# Altium schematic symbol library Robert_.SchLib: 177 symbols (part 3 of 6)
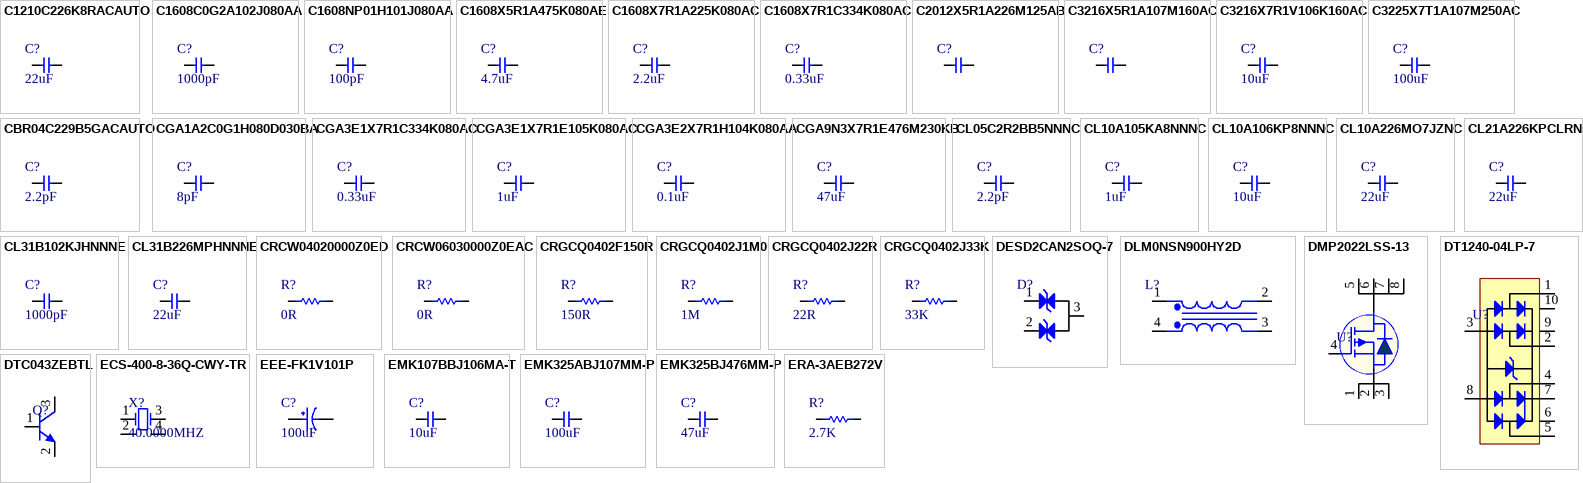
[diagram p8: symbols C1210C226K8RACAUTO to ERA-3AEB272V]

## CRGCQ0402J1M0
designator R?, comment 1M
RES 1M OHM 5% 1/16W 0402; Manufacturer: TE Connectivity; Manufacturer Part Number: CRGCQ0402J1M0; Value: 1MR; Max Power Dissipation: 63mW; Temperature Coefficient: 100ppm/°C; Power Rating: 62.5mW; Voltage Rating: 50V; Supplier: Arrow Electronics; Supplier Part Number: CRGCQ0402J1M0; RoHS: Yes; Category: Chip SMD Resistors; Stock: 50000; Pricing: 20000=0.0015 (USD); Case/Package: 0402; Case Code (Imperial): 0402; Case Code (Metric): 1005; Min Operating Temperature: -55°C; Max Operating Temperature: 155°C; Features: Moisture Resistant,Automotive AEC-Q200; Packaging: Cut Tape; Tolerance: 5%; Number of Terminations: 2; Series: CRGCQ; Voltage Rating (DC): 50V; Height: 400um; Ratings: AEC-Q200; RoHS Compliant: Yes; ComponentLink1URL: http://datasheet.octopart.com/CRGCQ0402J1M0-TE-Connectivity-datasheet-114679081.pdf?src-supplier=Mouser; ComponentLink1Description: http://datasheet.octopart.com/CRGCQ0402J1M0-TE-Connectivity-datasheet-114679081.pdf?src-supplier=Mouser; ComponentLink2URL: http://datasheet.octopart.com/CRGCQ0402J1M0-TE-Connectivity-datasheet-114679081.pdf?src-supplier=Arrow+Electronics; ComponentLink2Description: http://datasheet.octopart.com/CRGCQ0402J1M0-TE-Connectivity-datasheet-114679081.pdf?src-supplier=Arrow+Electronics; ComponentLink3URL: http://datasheet.octopart.com/CRGCQ0402J1M0-TE-Connectivity-datasheet-114679081.pdf?src-supplier=Onlinecomponents.com; ComponentLink3Description: http://datasheet.octopart.com/CRGCQ0402J1M0-TE-Connectivity-datasheet-114679081.pdf?src-supplier=Onlinecomponents.com; ComponentLink4URL: http://datasheet.octopart.com/CRGCQ0402J1M0-TE-Connectivity-datasheet-114679081.pdf?src-supplier=Digi-Key; ComponentLink4Description: http://datasheet.octopart.com/CRGCQ0402J1M0-TE-Connectivity-datasheet-114679081.pdf?src-supplier=Digi-Key; ComponentLink5URL: http://datasheet.octopart.com/CRGCQ0402J1M0-TE-Connectivity-datasheet-114679081.pdf?src-supplier=Verical; ComponentLink5Description: http://datasheet.octopart.com/CRGCQ0402J1M0-TE-Connectivity-datasheet-114679081.pdf?src-supplier=Verical; ComponentLink6URL: https://www.te.com/commerce/DocumentDelivery/DDEController?Action=srchrtrv&DocNm=1773204-3&DocType=DS&DocLang=English&src-supplier=Digi-Key; ComponentLink6Description: https://www.te.com/commerce/DocumentDelivery/DDEController?Action=srchrtrv&DocNm=1773204-3&DocType=DS&DocLang=English&src-supplier=Digi-Key; ComponentLink7URL: http://datasheet.octopart.com/CRGCQ0402J1M0-TE-Connectivity-datasheet-114679081.pdf?src-supplier=Newark; ComponentLink7Description: http://datasheet.octopart.com/CRGCQ0402J1M0-TE-Connectivity-datasheet-114679081.pdf?src-supplier=Newark; ComponentLink8URL: http://datasheet.octopart.com/CRGCQ0402J1M0-TE-Connectivity-datasheet-114679081.pdf?src-supplier=Avnet; ComponentLink8Description: http://datasheet.octopart.com/CRGCQ0402J1M0-TE-Connectivity-datasheet-114679081.pdf?src-supplier=Avnet; ComponentLink9URL: http://datasheet.octopart.com/CRGCQ0402J1M0-TE-Connectivity-datasheet-114679081.pdf?src-supplier=Farnell; ComponentLink9Description: http://datasheet.octopart.com/CRGCQ0402J1M0-TE-Connectivity-datasheet-114679081.pdf?src-supplier=Farnell; ComponentLink10URL: http://datasheet.octopart.com/CRGCQ0402J1M0-TE-Connectivity-datasheet-114679081.pdf?src-supplier=Sager+Electronics; ComponentLink10Description: http://datasheet.octopart.com/CRGCQ0402J1M0-TE-Connectivity-datasheet-114679081.pdf?src-supplier=Sager+Electronics; ComponentLink11URL: http://datasheet.octopart.com/CRGCQ0402J1M0-TE-Connectivity-datasheet-114679081.pdf?src-supplier=TME; ComponentLink11Description: http://datasheet.octopart.com/CRGCQ0402J1M0-TE-Connectivity-datasheet-114679081.pdf?src-supplier=TME; ComponentLink12URL: http://datasheet.octopart.com/CRGCQ0402J1M0-TE-Connectivity-datasheet-114679081.pdf?src-supplier=Electro+Sonic; ComponentLink12Description: http://datasheet.octopart.com/CRGCQ0402J1M0-TE-Connectivity-datasheet-114679081.pdf?src-supplier=Electro+Sonic; ComponentLink13URL: http://datasheet.octopart.com/CRGCQ0402J1M0-TE-Connectivity-datasheet-114679081.pdf?src-supplier=Interstate+Connecting+Components; ComponentLink13Description: http://datasheet.octopart.com/CRGCQ0402J1M0-TE-Connectivity-datasheet-114679081.pdf?src-supplier=Interstate+Connecting+Components; ComponentLink14URL: http://datasheet.octopart.com/CRGCQ0402J1M0-TE-Connectivity-datasheet-114679081.pdf?src-supplier=Heilind+Electronics; ComponentLink14Description: http://datasheet.octopart.com/CRGCQ0402J1M0-TE-Connectivity-datasheet-114679081.pdf?src-supplier=Heilind+Electronics; ComponentLink15URL: https://datasheet.octopart.com/CRGCQ0402J1M0-TE-Connectivity-datasheet-114679081.pdf?src-supplier=Master+Electronics; ComponentLink15Description: https://datasheet.octopart.com/CRGCQ0402J1M0-TE-Connectivity-datasheet-114679081.pdf?src-supplier=Master+Electronics
footprint Res-0402
pins: 1, 2

## CRGCQ0402J22R
designator R?, comment 22R
RES 22 OHM 5% 1/16W 0402; Manufacturer: TE Connectivity; Manufacturer Part Number: CRGCQ0402J22R; Supplier: Avnet; Supplier Part Number: 73AC8982; RoHS: Yes; Category: Chip SMD Resistors; Stock: 20000; Pricing: 1=0.036, 25=0.01, 100=0.008, 250=0.006, 500=0.005 (USD); ComponentLink1URL: https://www.te.com/commerce/DocumentDelivery/DDEController?Action=srchrtrv&amp;DocNm=1773204-3&amp;DocType=DS&amp;DocLang=English&src-supplier=Digi-Key; ComponentLink1Description: https://www.te.com/commerce/DocumentDelivery/DDEController?Action=srchrtrv&amp;DocNm=1773204-3&amp;DocType=DS&amp;DocLang=English&src-supplier=Digi-Key; ComponentLink2URL: https://4donline.ihs.com/images/VipMasterIC/IC/TYEL/TYEL-S-A0004929575/TYEL-S-A0004929575-1.pdf?hkey=52A5661711E402568146F3353EA87419&src-supplier=Newark; ComponentLink2Description: https://4donline.ihs.com/images/VipMasterIC/IC/TYEL/TYEL-S-A0004929575/TYEL-S-A0004929575-1.pdf?hkey=52A5661711E402568146F3353EA87419&src-supplier=Newark; ComponentLink3URL: https://4donline.ihs.com/images/VipMasterIC/IC/TYEL/TYEL-S-A0004929575/TYEL-S-A0004929575-1.pdf?hkey=52A5661711E402568146F3353EA87419&src-supplier=Element14; ComponentLink3Description: https://4donline.ihs.com/images/VipMasterIC/IC/TYEL/TYEL-S-A0004929575/TYEL-S-A0004929575-1.pdf?hkey=52A5661711E402568146F3353EA87419&src-supplier=Element14; ComponentLink4URL: https://datasheet.octopart.com/CRGCQ0402J22R-TE-Connectivity-datasheet-114679081.pdf?src-supplier=Master+Electronics; ComponentLink4Description: https://datasheet.octopart.com/CRGCQ0402J22R-TE-Connectivity-datasheet-114679081.pdf?src-supplier=Master+Electronics
footprint Res-0402
pins: 1, 2

## CRGCQ0402J33K
designator R?, comment 33K
RES 33K OHM 5% 1/16W 0402; Manufacturer: TE Connectivity; Manufacturer Part Number: CRGCQ0402J33K; Value: 33kR; Max Power Dissipation: 63mW; Temperature Coefficient: 100ppm/°C; Power Rating: 62.5mW; Voltage Rating: 50V; Supplier: Arrow Electronics; Supplier Part Number: CRGCQ0402J33K; RoHS: Yes; Category: Chip SMD Resistors; Stock: 7846; Pricing: 1=0.0162, 10=0.0016, 100=0.0008, 500=0.0007, 1000=0.0005, 6000=0.0004 (USD); Case/Package: 0402; Case Code (Imperial): 0402; Case Code (Metric): 1005; Min Operating Temperature: -55°C; Max Operating Temperature: 155°C; Features: Moisture Resistant,Automotive AEC-Q200; Packaging: Cut Tape; Tolerance: 5%; Number of Terminations: 2; Series: CRGCQ; Voltage Rating (DC): 50V; Height: 400um; Ratings: AEC-Q200; RoHS Compliant: Yes; ComponentLink1URL: http://datasheet.octopart.com/CRGCQ0402J33K-TE-Connectivity-datasheet-114679081.pdf?src-supplier=Mouser; ComponentLink1Description: http://datasheet.octopart.com/CRGCQ0402J33K-TE-Connectivity-datasheet-114679081.pdf?src-supplier=Mouser; ComponentLink2URL: http://datasheet.octopart.com/CRGCQ0402J33K-TE-Connectivity-datasheet-114679081.pdf?src-supplier=Verical; ComponentLink2Description: http://datasheet.octopart.com/CRGCQ0402J33K-TE-Connectivity-datasheet-114679081.pdf?src-supplier=Verical; ComponentLink3URL: http://datasheet.octopart.com/CRGCQ0402J33K-TE-Connectivity-datasheet-114679081.pdf?src-supplier=Onlinecomponents.com; ComponentLink3Description: http://datasheet.octopart.com/CRGCQ0402J33K-TE-Connectivity-datasheet-114679081.pdf?src-supplier=Onlinecomponents.com; ComponentLink4URL: http://datasheet.octopart.com/CRGCQ0402J33K-TE-Connectivity-datasheet-114679081.pdf?src-supplier=Arrow+Electronics; ComponentLink4Description: http://datasheet.octopart.com/CRGCQ0402J33K-TE-Connectivity-datasheet-114679081.pdf?src-supplier=Arrow+Electronics; ComponentLink5URL: http://datasheet.octopart.com/CRGCQ0402J33K-TE-Connectivity-datasheet-114679081.pdf?src-supplier=Digi-Key; ComponentLink5Description: http://datasheet.octopart.com/CRGCQ0402J33K-TE-Connectivity-datasheet-114679081.pdf?src-supplier=Digi-Key; ComponentLink6URL: https://www.te.com/commerce/DocumentDelivery/DDEController?Action=srchrtrv&DocNm=1773204-3&DocType=DS&DocLang=English&src-supplier=Digi-Key; ComponentLink6Description: https://www.te.com/commerce/DocumentDelivery/DDEController?Action=srchrtrv&DocNm=1773204-3&DocType=DS&DocLang=English&src-supplier=Digi-Key; ComponentLink7URL: http://datasheet.octopart.com/CRGCQ0402J33K-TE-Connectivity-datasheet-114679081.pdf?src-supplier=Newark; ComponentLink7Description: http://datasheet.octopart.com/CRGCQ0402J33K-TE-Connectivity-datasheet-114679081.pdf?src-supplier=Newark; ComponentLink8URL: http://datasheet.octopart.com/CRGCQ0402J33K-TE-Connectivity-datasheet-114679081.pdf?src-supplier=Farnell; ComponentLink8Description: http://datasheet.octopart.com/CRGCQ0402J33K-TE-Connectivity-datasheet-114679081.pdf?src-supplier=Farnell; ComponentLink9URL: http://datasheet.octopart.com/CRGCQ0402J33K-TE-Connectivity-datasheet-114679081.pdf?src-supplier=Avnet; ComponentLink9Description: http://datasheet.octopart.com/CRGCQ0402J33K-TE-Connectivity-datasheet-114679081.pdf?src-supplier=Avnet; ComponentLink10URL: http://datasheet.octopart.com/CRGCQ0402J33K-TE-Connectivity-datasheet-114679081.pdf?src-supplier=TME; ComponentLink10Description: http://datasheet.octopart.com/CRGCQ0402J33K-TE-Connectivity-datasheet-114679081.pdf?src-supplier=TME; ComponentLink11URL: http://datasheet.octopart.com/CRGCQ0402J33K-TE-Connectivity-datasheet-114679081.pdf?src-supplier=Interstate+Connecting+Components; ComponentLink11Description: http://datasheet.octopart.com/CRGCQ0402J33K-TE-Connectivity-datasheet-114679081.pdf?src-supplier=Interstate+Connecting+Components; ComponentLink12URL: http://datasheet.octopart.com/CRGCQ0402J33K-TE-Connectivity-datasheet-114679081.pdf?src-supplier=Heilind+Electronics; ComponentLink12Description: http://datasheet.octopart.com/CRGCQ0402J33K-TE-Connectivity-datasheet-114679081.pdf?src-supplier=Heilind+Electronics; ComponentLink13URL: http://datasheet.octopart.com/CRGCQ0402J33K-TE-Connectivity-datasheet-114679081.pdf?src-supplier=Electro+Sonic; ComponentLink13Description: http://datasheet.octopart.com/CRGCQ0402J33K-TE-Connectivity-datasheet-114679081.pdf?src-supplier=Electro+Sonic; ComponentLink14URL: http://datasheet.octopart.com/CRGCQ0402J33K-TE-Connectivity-datasheet-114679081.pdf?src-supplier=Sager+Electronics; ComponentLink14Description: http://datasheet.octopart.com/CRGCQ0402J33K-TE-Connectivity-datasheet-114679081.pdf?src-supplier=Sager+Electronics; ComponentLink15URL: https://datasheet.octopart.com/CRGCQ0402J33K-TE-Connectivity-datasheet-114679081.pdf?src-supplier=Master+Electronics; ComponentLink15Description: https://datasheet.octopart.com/CRGCQ0402J33K-TE-Connectivity-datasheet-114679081.pdf?src-supplier=Master+Electronics
footprint Res-0402
pins: 1, 2

## DESD2CAN2SOQ-7
designator D?
TVS DIODE 24VWM 41VC SOT23; Manufacturer: Diodes; Manufacturer Part Number: DESD2CAN2SOQ-7; Number of Bidirectional Channels: 2; Reverse Standoff Voltage: 24V; Min Breakdown Voltage: 25.4V; Peak Pulse Power: 230W; Power Line Protection: No; Peak Pulse Current: 5A; Diode Type: ZENER; Supplier: Future Electronics; Supplier Part Number: 5053887; RoHS: Yes; Category: TVS Diodes; Stock: 18000; Pricing: 3000=0.109, 6000=0.107, 12000=0.105, 15000=0.104, 45000=0.101 (USD); Mounting Technology: Surface Mount; Case/Package: TO-236-3; Min Operating Temperature: -65°C; Max Operating Temperature: 150°C; Packaging: Cut Tape; Series: Automotive, AEC-Q101; RoHS Compliant: Yes; ComponentLink1URL: http://www.farnell.com/datasheets/2814365.pdf?src-supplier=Farnell; ComponentLink1Description: http://www.farnell.com/datasheets/2814365.pdf?src-supplier=Farnell; ComponentLink2URL: http://www.mouser.com/ds/2/115/DESD2CAN2SOQ-520157.pdf?src-supplier=Mouser; ComponentLink2Description: http://www.mouser.com/ds/2/115/DESD2CAN2SOQ-520157.pdf?src-supplier=Mouser; ComponentLink3URL: http://www.farnell.com/datasheets/2814365.pdf?src-supplier=Newark; ComponentLink3Description: http://www.farnell.com/datasheets/2814365.pdf?src-supplier=Newark; ComponentLink4URL: http://www.farnell.com/datasheets/2814365.pdf?src-supplier=Element14; ComponentLink4Description: http://www.farnell.com/datasheets/2814365.pdf?src-supplier=Element14; ComponentLink5URL: https://www.diodes.com/assets/Datasheets/DESD2CAN2SOQ.pdf?src-supplier=Digi-Key; ComponentLink5Description: https://www.diodes.com/assets/Datasheets/DESD2CAN2SOQ.pdf?src-supplier=Digi-Key
footprint SOT-23 (TRANS NPN 40V 0.6A SOT23)
pins: 1, 2, 3

## DLM0NSN900HY2D
designator L?
CMC 100MA 2LN 90 OHM SMD; Manufacturer: Murata; Manufacturer Part Number: DLM0NSN900HY2D; Impedance: 90R; Number of Lines: 2; Voltage Rating (DC): 5V; Supplier: Rs; Supplier Part Number: 2235027P; RoHS: Yes; Category: Common Mode Chokes; Stock: 4650; Pricing: 250=0.066, 500=0.054, 1000=0.05, 2500=0.043 (GBP); Mounting Technology: Surface Mount; Case Code (Imperial): 0302; Case Code (Metric): 0806; Min Operating Temperature: -40°C; Max Operating Temperature: 85°C; Series: -; Max Current Rating: 100mA; Length: 850um; Width: 650um; RoHS Compliant: Yes; ComponentLink1URL: https://datasheet.octopart.com/DLM0NSN900HY2D-Murata-datasheet-140316808.pdf?src-supplier=Element14; ComponentLink1Description: https://datasheet.octopart.com/DLM0NSN900HY2D-Murata-datasheet-140316808.pdf?src-supplier=Element14; ComponentLink2URL: https://www.murata.com/en-global/products/productdata/8799424610334/EFLD0009.pdf?src-supplier=Digi-Key; ComponentLink2Description: https://www.murata.com/en-global/products/productdata/8799424610334/EFLD0009.pdf?src-supplier=Digi-Key; ComponentLink3URL: https://datasheet.octopart.com/DLM0NSN900HY2D-Murata-datasheet-140316808.pdf?src-supplier=Newark; ComponentLink3Description: https://datasheet.octopart.com/DLM0NSN900HY2D-Murata-datasheet-140316808.pdf?src-supplier=Newark
footprint DLM0NSN900HY2D
pins: 1, 2, 3, 4

## DMP2022LSS-13
designator U?
MOSFET P-CH 20V 10A 8SOP; Manufacturer: Diodes; Manufacturer Part Number: DMP2022LSS-13; Supplier: Avnet; Supplier Part Number: DMP2022LSS-13; RoHS: Yes; Category: MOSFETs; Stock: 37500; Pricing: 2500=0.18459, 5000=0.17798, 10000=0.17262, 15000=0.16758, 20000=0.16128, 25000=0.15876, 250000=0.15624 (USD); ComponentLink1URL: https://datasheet.ciiva.com/946/ds31373-946629.pdf?src-supplier=Digi-Key; ComponentLink1Description: https://datasheet.ciiva.com/946/ds31373-946629.pdf?src-supplier=Digi-Key; ComponentLink2URL: https://datasheet.ciiva.com/946/ds31373-946629.pdf?src-supplier=Avnet; ComponentLink2Description: https://datasheet.ciiva.com/946/ds31373-946629.pdf?src-supplier=Avnet; ComponentLink3URL: https://datasheet.ciiva.com/13045/ds31373-89644-13045812.pdf?src-supplier=Mouser; ComponentLink3Description: https://datasheet.ciiva.com/13045/ds31373-89644-13045812.pdf?src-supplier=Mouser; ComponentLink4URL: https://datasheet.ciiva.com/946/ds31373-946630.pdf?src-supplier=Digi-Key; ComponentLink4Description: https://datasheet.ciiva.com/946/ds31373-946630.pdf?src-supplier=Digi-Key; ComponentLink5URL: https://datasheet.ciiva.com/946/ds31373-946631.pdf?src-supplier=Digi-Key; ComponentLink5Description: https://datasheet.ciiva.com/946/ds31373-946631.pdf?src-supplier=Digi-Key; ComponentLink6URL: https://datasheet.ciiva.com/11174/ds31373-11174902.pdf?src-supplier=Avnet; ComponentLink6Description: https://datasheet.ciiva.com/11174/ds31373-11174902.pdf?src-supplier=Avnet
footprint SOIC-8
pins: 1 S, 2 S, 3 S, 4 G, 5 D, 6 D, 7 D, 8 D

## DT1240-04LP-7
designator U?
TVS DIODE 5.5VWM 11VC U-DFN2510; Manufacturer: Diodes; Manufacturer Part Number: DT1240-04LP-7; Supplier: Digi-Key; Supplier Part Number: DT1240-04LP-7DICT-ND; RoHS: Yes; Category: TVS Diodes; Stock: 985; Pricing: 1=0.46, 10=0.319, 100=0.1612, 500=0.1315, 1000=0.09757 (USD); ComponentLink1URL: https://datasheet.ciiva.com/29574/dt1240-04lp-29574117.pdf?src-supplier=Digi-Key; ComponentLink1Description: https://datasheet.ciiva.com/29574/dt1240-04lp-29574117.pdf?src-supplier=Digi-Key; ComponentLink2URL: https://datasheet.ciiva.com/48480/dt1240-04lp-48480037.pdf?src-supplier=Avnet; ComponentLink2Description: https://datasheet.ciiva.com/48480/dt1240-04lp-48480037.pdf?src-supplier=Avnet; ComponentLink3URL: https://datasheet.ciiva.com/29574/dt1240-04lp-29574118.pdf?src-supplier=Digi-Key; ComponentLink3Description: https://datasheet.ciiva.com/29574/dt1240-04lp-29574118.pdf?src-supplier=Digi-Key; ComponentLink4URL: https://datasheet.ciiva.com/29574/dt1240-04lp-29574119.pdf?src-supplier=Digi-Key; ComponentLink4Description: https://datasheet.ciiva.com/29574/dt1240-04lp-29574119.pdf?src-supplier=Digi-Key
footprint U-DFN2510-10
pins: 1, 2, 3, 4, 5, 6, 7, 8, 9, 10

## DTC043ZEBTL
designator Q?
TRANS PREBIAS NPN 50V EMT3F; Manufacturer: Rohm; Manufacturer Part Number: DTC043ZEBTL; Supplier: Mouser; Supplier Part Number: 755-DTC043ZEBTL; RoHS: Yes; Category: BJTs; Stock: 9280; Pricing: 1=0.19, 10=0.182, 50=0.182, 100=0.099, 1000=0.042, 10000=0.031 (USD); ComponentLink1URL: http://www.mouser.com/ds/2/348/tc043zebtl-e-1019210.pdf?src-supplier=Mouser; ComponentLink1Description: http://www.mouser.com/ds/2/348/tc043zebtl-e-1019210.pdf?src-supplier=Mouser; ComponentLink2URL: http://www.farnell.com/datasheets/2644341.pdf?src-supplier=Newark; ComponentLink2Description: http://www.farnell.com/datasheets/2644341.pdf?src-supplier=Newark; ComponentLink3URL: https://datasheet.octopart.com/DTC043ZEBTL-Rohm-datasheet-136771937.pdf?src-supplier=Future+Electronics; ComponentLink3Description: https://datasheet.octopart.com/DTC043ZEBTL-Rohm-datasheet-136771937.pdf?src-supplier=Future+Electronics; ComponentLink4URL: http://rohmfs.rohm.com/en/techdata_basic/transistor/taping/EMT3_TL_taping.pdf?src-supplier=Digi-Key; ComponentLink4Description: http://rohmfs.rohm.com/en/techdata_basic/transistor/taping/EMT3_TL_taping.pdf?src-supplier=Digi-Key; ComponentLink5URL: http://rohmfs.rohm.com/en/products/databook/datasheet/discrete/transistor/digital/dtc043zmt2l-e.pdf?src-supplier=Digi-Key; ComponentLink5Description: http://rohmfs.rohm.com/en/products/databook/datasheet/discrete/transistor/digital/dtc043zmt2l-e.pdf?src-supplier=Digi-Key; ComponentLink6URL: http://avnetexpress.avnet.com/store/em/EMController/Digital-BJT/Rohm-Semiconductor/DTC043ZEBTL/_/R-16023578/A-16023578/rohmfs.rohm.com/en/products/databook/datasheet/discrete/transistor/digital/dtc043zeb.pdf?src-supplier=Avnet; ComponentLink6Description: http://avnetexpress.avnet.com/store/em/EMController/Digital-BJT/Rohm-Semiconductor/DTC043ZEBTL/_/R-16023578/A-16023578/rohmfs.rohm.com/en/products/databook/datasheet/discrete/transistor/digital/dtc043zeb.pdf?src-supplier=Avnet
footprint SOT-416FL
pins: 1 B, 2 E, 3 C

## ECS-400-8-36Q-CWY-TR
designator X?, comment 40.0000MHZ
CRYSTAL 40.0000MHZ 8PF SMD; Manufacturer: ECS International; Manufacturer Part Number: ECS-400-8-36Q-CWY-TR; Supplier: Arrow Electronics; Supplier Part Number: ECS-400-8-36Q-CWY-TR; RoHS: Yes; Stock: 6075; Pricing: 1=0.4202, 10=0.3684, 25=0.3672, 50=0.3595, 100=0.3453, 250=0.3387, 500=0.3374, 1000=0.3046, 3000=0.2984, 6000=0.2949 (USD); ComponentLink1URL: https://www.ecsxtal.com/store/pdf/ECX-2236Q.pdf?src-supplier=Digi-Key; ComponentLink1Description: https://www.ecsxtal.com/store/pdf/ECX-2236Q.pdf?src-supplier=Digi-Key; ComponentLink2URL: https://datasheet.octopart.com/ECS-400-8-36Q-CWY-TR-ECS-International-datasheet-101745705.pdf?src-supplier=Master+Electronics; ComponentLink2Description: https://datasheet.octopart.com/ECS-400-8-36Q-CWY-TR-ECS-International-datasheet-101745705.pdf?src-supplier=Master+Electronics; Item Type: Crystal
footprint ECS-400-8-36Q-CWY-TR
pins: 1 In/Out, 2 GND, 3 Out/In, 4 GND

## EEE-FK1V101P
designator C?, comment 100uF
Cap Ceramic 3.9uF 25V X5R 10% SMD 1206 85°C Plastic T/R; Manufacturer: Panasonic; Manufacturer Part Number: EEE-FK1V101P; Supplier: Mouser; Supplier Part Number: 667-EEE-FK1V101P; RoHS: Yes; Category: Aluminum Electrolytic Capacitors; Stock: 32296; Pricing: 1=0.72, 10=0.426, 50=0.426, 100=0.365, 1000=0.228, 10000=0.203 (USD); ComponentLink1URL: https://www.verical.com/server-webapp/html/getDatasheet?partID=130432&src-supplier=Verical; ComponentLink1Description: https://www.verical.com/server-webapp/html/getDatasheet?partID=130432&src-supplier=Verical; ComponentLink2URL: https://datasheet.octopart.com/EEE-FK1V101P-Panasonic-datasheet-13266987.pdf?src-supplier=Farnell; ComponentLink2Description: https://datasheet.octopart.com/EEE-FK1V101P-Panasonic-datasheet-13266987.pdf?src-supplier=Farnell; ComponentLink3URL: https://datasheet.octopart.com/EEEFK1V101P-Panasonic-datasheet-136531309.pdf?src-supplier=TME; ComponentLink3Description: https://datasheet.octopart.com/EEEFK1V101P-Panasonic-datasheet-136531309.pdf?src-supplier=TME; ComponentLink4URL: https://datasheet.octopart.com/EEE-FK1V101P-Panasonic-datasheet-11546739.pdf?src-supplier=Electro+Sonic; ComponentLink4Description: https://datasheet.octopart.com/EEE-FK1V101P-Panasonic-datasheet-11546739.pdf?src-supplier=Electro+Sonic
footprint EEE-FK1V101P
pins: 1, 2

## EMK107BBJ106MA-T
designator C?, comment 10uF
CAP CER 10UF 16V X5R 0603; Manufacturer: Taiyo Yuden; Manufacturer Part Number: EMK107BBJ106MA-T; Material: 4241ConductorMaterial; Tolerance: 20%; Item Type: Capacitor; Supplier: Rs; Supplier Part Number: 1843904; RoHS: Yes; Category: Ceramic Capacitors; Stock: 12300; Pricing: 100=0.078, 200=0.071, 500=0.055 (GBP); Mounting Technology: Surface Mount; Case/Package: 0603; Case Code (Metric): 1608; Case Code (Imperial): 0603; Min Operating Temperature: -55°C; Max Operating Temperature: 85°C; Value: 10uF; Dielectric: X5R; Packaging: Tape and Reel; Voltage Rating: 16V; Package Quantity: 1; Termination: SMD/SMT; Voltage Rating (DC): 16V; Series: M; Construction: Flat; Length: 0.063inch; Width: 0.031inch; Height: 0.8mm; Thickness: 0.031inch; Halogen Free: Halogen Free; RoHS Compliant: Yes; Reach SVHC Compliant: Unknown; ComponentLink1URL: https://datasheet.ciiva.com/6259/emk107bbj106ma-t-6259169.pdf?src-supplier=Digi-Key; ComponentLink1Description: https://datasheet.ciiva.com/6259/emk107bbj106ma-t-6259169.pdf?src-supplier=Digi-Key; ComponentLink2URL: https://datasheet.ciiva.com/15920/3emk107bbj106ma-t-15920482.pdf?src-supplier=Onlinecomponents.com; ComponentLink2Description: https://datasheet.ciiva.com/15920/3emk107bbj106ma-t-15920482.pdf?src-supplier=Onlinecomponents.com; ComponentLink3URL: https://datasheet.ciiva.com/34372/463emk107bbj106ma-t-34372674.pdf?src-supplier=Onlinecomponents.com; ComponentLink3Description: https://datasheet.ciiva.com/34372/463emk107bbj106ma-t-34372674.pdf?src-supplier=Onlinecomponents.com; ComponentLink4URL: https://datasheet.ciiva.com/6259/emk107bbj106ma-t-6259167.pdf?src-supplier=Digi-Key; ComponentLink4Description: https://datasheet.ciiva.com/6259/emk107bbj106ma-t-6259167.pdf?src-supplier=Digi-Key; ComponentLink5URL: https://datasheet.ciiva.com/6259/emk107bbj106ma-t-6259164.pdf?src-supplier=Digi-Key; ComponentLink5Description: https://datasheet.ciiva.com/6259/emk107bbj106ma-t-6259164.pdf?src-supplier=Digi-Key; ComponentLink6URL: https://datasheet.ciiva.com/13168/mlcc01-e-13168735.pdf?src-supplier=Mouser; ComponentLink6Description: https://datasheet.ciiva.com/13168/mlcc01-e-13168735.pdf?src-supplier=Mouser
footprint Cap-0603
pins: 1, 2

## EMK325ABJ107MM-P
designator C?, comment 100uF
CAP CER 100UF 16V X5R 1210; Manufacturer: Taiyo Yuden; Manufacturer Part Number: EMK325ABJ107MM-P; Tolerance: 20%; Item Type: Capacitor; Supplier: Rs; Supplier Part Number: 1843298; RoHS: Yes; Category: Ceramic Capacitors; Stock: 19000; Pricing: 1000=0.686 (GBP); Mounting Technology: Surface Mount; Case/Package: 1210; Case Code (Imperial): 1210; Case Code (Metric): 3225; Min Operating Temperature: -55°C; Max Operating Temperature: 85°C; Packaging: Cut Tape; Value: 100uF; Voltage Rating: 16V; Series: M; Lead Free: Lead Free; RoHS Compliant: Yes; ComponentLink1URL: http://ds.yuden.co.jp/TYCOMPAS/ut/detail.do?productNo=EMK325ABJ107MM-P&fileName=EMK325ABJ107MM-P_SS&mode=specSheetDownload&src-supplier=Digi-Key; ComponentLink1Description: http://ds.yuden.co.jp/TYCOMPAS/ut/detail.do?productNo=EMK325ABJ107MM-P&fileName=EMK325ABJ107MM-P_SS&mode=specSheetDownload&src-supplier=Digi-Key; ComponentLink2URL: https://datasheet.octopart.com/EMK325ABJ107MM-P-Taiyo-Yuden-datasheet-140424376.pdf?src-supplier=Master+Electronics; ComponentLink2Description: https://datasheet.octopart.com/EMK325ABJ107MM-P-Taiyo-Yuden-datasheet-140424376.pdf?src-supplier=Master+Electronics
footprint Cap-1210 (SMD 1210)
pins: 1, 2

## EMK325BJ476MM-P
designator C?, comment 47uF
CAP CER 47UF 16V X5R 1210; Manufacturer: Taiyo Yuden; Manufacturer Part Number: EMK325BJ476MM-P; Item Type: Capacitor; Supplier: Avnet; Supplier Part Number: EMK325BJ476MM-P; RoHS: Yes; Category: Ceramic Capacitors; Stock: 14000; Pricing: 1000=0.21075, 2000=0.20602, 4000=0.19654, 6000=0.19181, 8000=0.18707 (USD); Voltage Rating (DC): 16V; Height: 2.7mm; ComponentLink1URL: https://ds.yuden.co.jp/TYCOMPAS/ut/detail?pn=EMK325BJ476MM-P &amp;u=M&src-supplier=Digi-Key; ComponentLink1Description: https://ds.yuden.co.jp/TYCOMPAS/ut/detail?pn=EMK325BJ476MM-P &amp;u=M&src-supplier=Digi-Key; ComponentLink2URL: http://ds.yuden.co.jp/TYCOMPAS/ut/detail.do?productNo=EMK325BJ476MM-P&fileName=EMK325BJ476MM-P_SS&mode=specSheetDownload&src-supplier=Digi-Key; ComponentLink2Description: http://ds.yuden.co.jp/TYCOMPAS/ut/detail.do?productNo=EMK325BJ476MM-P&fileName=EMK325BJ476MM-P_SS&mode=specSheetDownload&src-supplier=Digi-Key; ComponentLink3URL: https://datasheet.octopart.com/EMK325BJ476MM-P-Taiyo-Yuden-datasheet-99833418.pdf?src-supplier=Future+Electronics; ComponentLink3Description: https://datasheet.octopart.com/EMK325BJ476MM-P-Taiyo-Yuden-datasheet-99833418.pdf?src-supplier=Future+Electronics
footprint Cap-1210 (SMD 1210)
pins: 1, 2

## ERA-3AEB272V
designator R?, comment 2.7K
RES SMD 2.7K OHM 0.1% 1/10W 0603; Manufacturer: Panasonic; Manufacturer Part Number: ERA-3AEB272V; Supplier: Mouser; Supplier Part Number: 667-ERA-3AEB272V; RoHS: Yes; Category: Chip SMD Resistors; Stock: 13910; Pricing: 1=0.34, 10=0.224, 50=0.224, 100=0.09, 1000=0.05, 10000=0.036 (USD); ComponentLink1URL: https://datasheet.ciiva.com/11808/0900766b80fe20f7-11808049.pdf?src-supplier=Rs; ComponentLink1Description: https://datasheet.ciiva.com/11808/0900766b80fe20f7-11808049.pdf?src-supplier=Rs; ComponentLink2URL: https://datasheet.ciiva.com/29183/450927-da-01-en-widerstand-0603-era-29183778.pdf?src-supplier=Conrad; ComponentLink2Description: https://datasheet.ciiva.com/29183/450927-da-01-en-widerstand-0603-era-29183778.pdf?src-supplier=Conrad; ComponentLink3URL: https://datasheet.ciiva.com/9196/aoa0000ce26-9196935.pdf?src-supplier=Avnet; ComponentLink3Description: https://datasheet.ciiva.com/9196/aoa0000ce26-9196935.pdf?src-supplier=Avnet; ComponentLink4URL: https://datasheet.ciiva.com/43457/485442-43457768.pdf?src-supplier=Farnell; ComponentLink4Description: https://datasheet.ciiva.com/43457/485442-43457768.pdf?src-supplier=Farnell; ComponentLink5URL: https://datasheet.ciiva.com/43455/485442-43455224.pdf?src-supplier=Farnell; ComponentLink5Description: https://datasheet.ciiva.com/43455/485442-43455224.pdf?src-supplier=Farnell; ComponentLink6URL: https://datasheet.ciiva.com/48530/era-eng-tds-48530485.pdf?src-supplier=Distrelec; ComponentLink6Description: https://datasheet.ciiva.com/48530/era-eng-tds-48530485.pdf?src-supplier=Distrelec; ComponentLink7URL: https://datasheet.ciiva.com/48425/era-eng-tds-48425448.pdf?src-supplier=Distrelec; ComponentLink7Description: https://datasheet.ciiva.com/48425/era-eng-tds-48425448.pdf?src-supplier=Distrelec; ComponentLink8URL: https://datasheet.ciiva.com/46422/485442-46422632.pdf?src-supplier=Element14; ComponentLink8Description: https://datasheet.ciiva.com/46422/485442-46422632.pdf?src-supplier=Element14; ComponentLink9URL: https://datasheet.ciiva.com/46422/485442-46422633.pdf?src-supplier=Element14; ComponentLink9Description: https://datasheet.ciiva.com/46422/485442-46422633.pdf?src-supplier=Element14; ComponentLink10URL: https://datasheet.ciiva.com/46422/485442-46422634.pdf?src-supplier=Element14; ComponentLink10Description: https://datasheet.ciiva.com/46422/485442-46422634.pdf?src-supplier=Element14; ComponentLink11URL: https://datasheet.ciiva.com/6000/485442-6000521.pdf?src-supplier=Farnell; ComponentLink11Description: https://datasheet.ciiva.com/6000/485442-6000521.pdf?src-supplier=Farnell; ComponentLink12URL: https://datasheet.ciiva.com/6000/485442-6000524.pdf?src-supplier=Farnell; ComponentLink12Description: https://datasheet.ciiva.com/6000/485442-6000524.pdf?src-supplier=Farnell
footprint Res-0603
pins: 1, 2

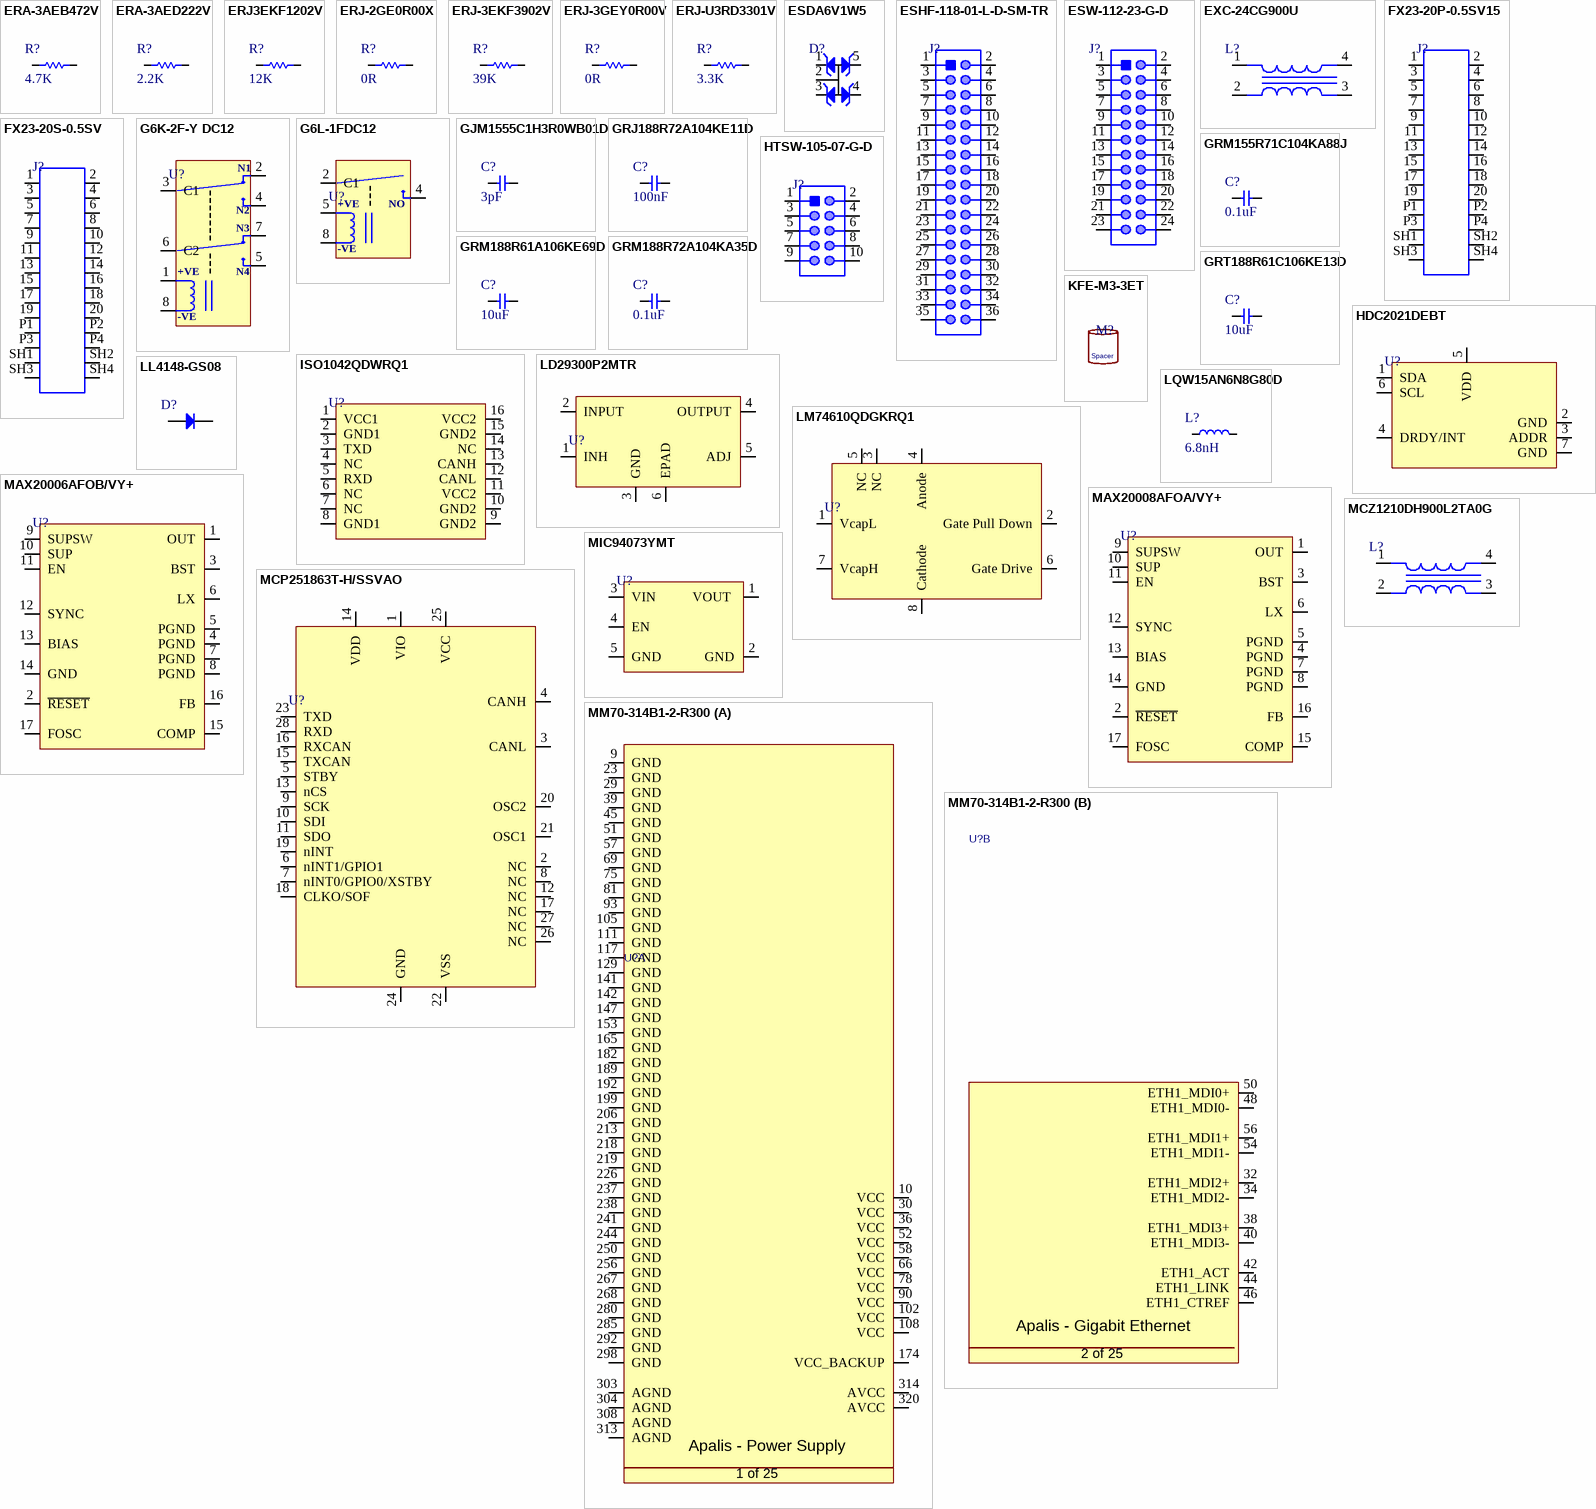
[diagram p2: symbols ERA-3AEB472V to MM70-314B1-2-R300]

## ERA-3AEB472V
designator R?, comment 4.7K
RES SMD 4.7K OHM 0.1% 1/10W 0603; Manufacturer: Panasonic; Manufacturer Part Number: ERA-3AEB472V; Supplier: Rs; Supplier Part Number: 566888P; RoHS: Yes; Category: Chip SMD Resistors; Stock: 5210; Pricing: 50=0.242, 100=0.198, 250=0.156, 500=0.114 (GBP); ComponentLink1URL: https://datasheet.ciiva.com/11808/0900766b80fe20f7-11808039.pdf?src-supplier=Rs; ComponentLink1Description: https://datasheet.ciiva.com/11808/0900766b80fe20f7-11808039.pdf?src-supplier=Rs; ComponentLink2URL: https://datasheet.ciiva.com/29183/451124-da-01-en-widerstand-0603-era-29183789.pdf?src-supplier=Conrad; ComponentLink2Description: https://datasheet.ciiva.com/29183/451124-da-01-en-widerstand-0603-era-29183789.pdf?src-supplier=Conrad; ComponentLink3URL: https://datasheet.ciiva.com/22743/485442-22743061.pdf?src-supplier=Element14; ComponentLink3Description: https://datasheet.ciiva.com/22743/485442-22743061.pdf?src-supplier=Element14; ComponentLink4URL: https://datasheet.ciiva.com/46422/485442-46422693.pdf?src-supplier=Element14; ComponentLink4Description: https://datasheet.ciiva.com/46422/485442-46422693.pdf?src-supplier=Element14; ComponentLink5URL: https://datasheet.ciiva.com/30078/54aoa0000ce26-30078815.pdf?src-supplier=Onlinecomponents.com; ComponentLink5Description: https://datasheet.ciiva.com/30078/54aoa0000ce26-30078815.pdf?src-supplier=Onlinecomponents.com; ComponentLink6URL: https://datasheet.ciiva.com/16772/70068849-16772572.pdf?src-supplier=Allied+Electronics; ComponentLink6Description: https://datasheet.ciiva.com/16772/70068849-16772572.pdf?src-supplier=Allied+Electronics; ComponentLink7URL: https://datasheet.ciiva.com/48425/era-eng-tds-48425470.pdf?src-supplier=Distrelec; ComponentLink7Description: https://datasheet.ciiva.com/48425/era-eng-tds-48425470.pdf?src-supplier=Distrelec; ComponentLink8URL: https://datasheet.ciiva.com/22781/485442-22781497.pdf?src-supplier=Farnell; ComponentLink8Description: https://datasheet.ciiva.com/22781/485442-22781497.pdf?src-supplier=Farnell; ComponentLink9URL: https://datasheet.ciiva.com/43455/485442-43455227.pdf?src-supplier=Farnell; ComponentLink9Description: https://datasheet.ciiva.com/43455/485442-43455227.pdf?src-supplier=Farnell; ComponentLink10URL: https://datasheet.ciiva.com/9117/aoa0000ce26-9117707.pdf?src-supplier=Avnet; ComponentLink10Description: https://datasheet.ciiva.com/9117/aoa0000ce26-9117707.pdf?src-supplier=Avnet; ComponentLink11URL: https://datasheet.ciiva.com/9116/aoa0000ce26-9116681.pdf?src-supplier=Avnet; ComponentLink11Description: https://datasheet.ciiva.com/9116/aoa0000ce26-9116681.pdf?src-supplier=Avnet
footprint Res-0603
pins: 1, 2

## ERA-3AED222V
designator R?, comment 2.2K
RES SMD 2.2K OHM 0.5% 1/10W 0603; Manufacturer: Panasonic; Manufacturer Part Number: ERA-3AED222V; Value: 2.2kR; Power Rating: 100mW; Voltage Rating: 150V; Temperature Coefficient: 25ppm/°C; Supplier: Digi-Key; Supplier Part Number: P123753DKR-ND; RoHS: Yes; Category: Chip SMD Resistors; Pricing: 1=0.27, 10=0.23, 25=0.1672, 50=0.1212, 100=0.0899, 250=0.069, 500=0.05436, 1000=0.03763 (USD); Mounting Technology: Surface Mount; Case/Package: 0603; Case Code (Imperial): 0603; Case Code (Metric): 1608; Contact Plating: Tin; Min Operating Temperature: -55°C; Max Operating Temperature: 155°C; Tolerance: 0.5%; Package Quantity: 5000; Packaging: Tape and Reel; Series: ERA-3A; Features: Automotive AEC-Q200; Max Power Dissipation: 100mW; Number of Terminations: 2; Length: 1.6mm; Width: 0.8mm; Height: 0.45mm; Ratings: AEC-Q200; Lead Free: Lead Free; RoHS Compliant: Yes; ComponentLink1URL: https://datasheet.ciiva.com/24024/aoa0000ce26-197354-24024457.pdf?src-supplier=Mouser; ComponentLink1Description: https://datasheet.ciiva.com/24024/aoa0000ce26-197354-24024457.pdf?src-supplier=Mouser
footprint Res-0603
pins: 1, 2

## ERJ3EKF1202V
designator R?, comment 12K
RES SMD 12K OHM 1% 1/10W 0603; Manufacturer: Panasonic; Manufacturer Part Number: ERJ3EKF1202V; Value: 12kR; Temperature Coefficient: 100ppm/°C; Power Rating: 100mW; Voltage Rating: 75V; Supplier: Mouser; Supplier Part Number: 667-ERJ-3EKF1202V; RoHS: Yes; Category: Chip SMD Resistors; Stock: 240811; Pricing: 1=0.1, 10=0.024, 50=0.024, 100=0.011, 1000=0.008, 10000=0.006 (USD); Mounting Technology: Surface Mount; Case/Package: 0603; Pins: 2; Contact Plating: Tin; Case Code (Metric): 1608; Case Code (Imperial): 0603; Weight: 7.1E-05oz; Min Operating Temperature: -55°C; Max Operating Temperature: 155°C; Tolerance: 1%; Packaging: Tape and Reel; Resistor Type: Thick Film; Number of Terminations: 2; Termination: SMD/SMT; Max Power Dissipation: 100mW; Voltage Rating (DC): 75V; Features: Automotive AEC-Q200; Package Quantity: 5000; Series: ERJ; Resistance Tolerance: 1%; Construction: Rectangular; Length: 1.6mm; Width: 0.8mm; Height: 0.45mm; Depth: 0.8mm; Radiation Hardening: No; Reach SVHC Compliant: No; Military Standard: Not; Lead Free: Lead Free; RoHS Compliant: Yes; ComponentLink1URL: https://datasheet.ciiva.com/6138/aoa0000ce2-6138712.pdf?src-supplier=Farnell; ComponentLink1Description: https://datasheet.ciiva.com/6138/aoa0000ce2-6138712.pdf?src-supplier=Farnell; ComponentLink2URL: https://datasheet.ciiva.com/7944/aoa0000ce2-7944617.pdf?src-supplier=Element14; ComponentLink2Description: https://datasheet.ciiva.com/7944/aoa0000ce2-7944617.pdf?src-supplier=Element14; ComponentLink3URL: https://datasheet.ciiva.com/22673/1678782-22673693.pdf?src-supplier=Element14; ComponentLink3Description: https://datasheet.ciiva.com/22673/1678782-22673693.pdf?src-supplier=Element14; ComponentLink4URL: https://datasheet.ciiva.com/22687/1678782-22687413.pdf?src-supplier=Element14; ComponentLink4Description: https://datasheet.ciiva.com/22687/1678782-22687413.pdf?src-supplier=Element14; ComponentLink5URL: https://datasheet.ciiva.com/46420/1678782-46420333.pdf?src-supplier=Element14; ComponentLink5Description: https://datasheet.ciiva.com/46420/1678782-46420333.pdf?src-supplier=Element14; ComponentLink6URL: https://datasheet.ciiva.com/24165/aoa0000ce2-24165037.pdf?src-supplier=Mouser; ComponentLink6Description: https://datasheet.ciiva.com/24165/aoa0000ce2-24165037.pdf?src-supplier=Mouser; ComponentLink7URL: https://datasheet.ciiva.com/16783/70260748-16783400.pdf?src-supplier=Allied+Electronics; ComponentLink7Description: https://datasheet.ciiva.com/16783/70260748-16783400.pdf?src-supplier=Allied+Electronics; ComponentLink8URL: https://datasheet.ciiva.com/30121/aoa0000ce2-30121109.pdf?src-supplier=Onlinecomponents.com; ComponentLink8Description: https://datasheet.ciiva.com/30121/aoa0000ce2-30121109.pdf?src-supplier=Onlinecomponents.com
footprint Res-0603
pins: 1, 2

## ERJ-2GE0R00X
designator R?, comment 0R
RES SMD 0 OHM JUMPER 1/10W 0402; Manufacturer: Panasonic; Manufacturer Part Number: ERJ-2GE0R00X; Value: 0mR; Power Rating: 100mW; Voltage Rating: 50V; Tolerance: 5%; Temperature Coefficient: 600ppm/°C; Supplier: Mouser; Supplier Part Number: 667-ERJ-2GE0R00X; RoHS: Yes; Category: Chip SMD Resistors; Stock: 10959876; Pricing: 1=0.1, 10=0.013, 50=0.013, 100=0.006, 1000=0.004, 10000=0.003 (USD); Mounting Technology: Surface Mount; Case/Package: 0402; Pins: 2NUMBER; Contact Plating: Tin; Case Code (Metric): 1005; Case Code (Imperial): 0402; Min Operating Temperature: -55°C; Max Operating Temperature: 155°C; Resistor Type: Thick Film; Packaging: Cut Tape; Package Quantity: 10000; Number of Terminations: 2; Termination: SMD/SMT; Max Power Dissipation: 100mW; Voltage Rating (DC): 50V; Features: Automotive AEC-Q200; Series: ERJ; Construction: Rectangular; Technology: THICK FILM; Length: 1mm; Width: 0.5mm; Height: 0.35mm; Depth: 0.5mm; Ratings: AEC-Q200; Radiation Hardening: No; Reach SVHC Compliant: No; Military Standard: Not; Lead Free: Lead Free; RoHS Compliant: Yes; ComponentLink1URL: https://datasheet.ciiva.com/11821/0900766b80f806dd-11821176.pdf?src-supplier=Rs; ComponentLink1Description: https://datasheet.ciiva.com/11821/0900766b80f806dd-11821176.pdf?src-supplier=Rs; ComponentLink2URL: https://datasheet.ciiva.com/46389/1678796-46389518.pdf?src-supplier=Element14; ComponentLink2Description: https://datasheet.ciiva.com/46389/1678796-46389518.pdf?src-supplier=Element14; ComponentLink3URL: https://datasheet.ciiva.com/28695/1678796-28695758.pdf?src-supplier=Element14; ComponentLink3Description: https://datasheet.ciiva.com/28695/1678796-28695758.pdf?src-supplier=Element14; ComponentLink4URL: https://datasheet.ciiva.com/16778/70260739-16778335.pdf?src-supplier=Allied+Electronics; ComponentLink4Description: https://datasheet.ciiva.com/16778/70260739-16778335.pdf?src-supplier=Allied+Electronics; ComponentLink5URL: https://datasheet.ciiva.com/48531/aoa0000ce1-48531077.pdf?src-supplier=Avnet; ComponentLink5Description: https://datasheet.ciiva.com/48531/aoa0000ce1-48531077.pdf?src-supplier=Avnet; ComponentLink6URL: https://datasheet.ciiva.com/30097/4aoa0000ce1-30097116.pdf?src-supplier=Onlinecomponents.com; ComponentLink6Description: https://datasheet.ciiva.com/30097/4aoa0000ce1-30097116.pdf?src-supplier=Onlinecomponents.com; ComponentLink7URL: https://datasheet.ciiva.com/43460/1678796-43460347.pdf?src-supplier=Farnell; ComponentLink7Description: https://datasheet.ciiva.com/43460/1678796-43460347.pdf?src-supplier=Farnell; ComponentLink8URL: https://datasheet.ciiva.com/5959/1678796-5959692.pdf?src-supplier=Farnell; ComponentLink8Description: https://datasheet.ciiva.com/5959/1678796-5959692.pdf?src-supplier=Farnell; ComponentLink9URL: https://datasheet.ciiva.com/16783/70260739-16783734.pdf?src-supplier=Allied+Electronics; ComponentLink9Description: https://datasheet.ciiva.com/16783/70260739-16783734.pdf?src-supplier=Allied+Electronics
footprint Res-0402
pins: 1, 2

## ERJ-3EKF3902V
designator R?, comment 39K
RES SMD 39K OHM 1% 1/10W 0603; Manufacturer: Panasonic; Manufacturer Part Number: ERJ-3EKF3902V; Supplier: Mouser; Supplier Part Number: 667-ERJ-3EKF3902V; RoHS: Yes; Category: Chip SMD Resistors; Stock: 186285; Pricing: 1=0.1, 10=0.024, 50=0.024, 100=0.011, 1000=0.008, 10000=0.005 (USD); ComponentLink1URL: https://datasheet.ciiva.com/5860/aoa0000ce2-5860662.pdf?src-supplier=Farnell; ComponentLink1Description: https://datasheet.ciiva.com/5860/aoa0000ce2-5860662.pdf?src-supplier=Farnell; ComponentLink2URL: https://datasheet.ciiva.com/9190/aoa0000ce2-9190015.pdf?src-supplier=Avnet; ComponentLink2Description: https://datasheet.ciiva.com/9190/aoa0000ce2-9190015.pdf?src-supplier=Avnet; ComponentLink3URL: https://datasheet.ciiva.com/24165/aoa0000ce2-24165687.pdf?src-supplier=Mouser; ComponentLink3Description: https://datasheet.ciiva.com/24165/aoa0000ce2-24165687.pdf?src-supplier=Mouser; ComponentLink4URL: https://datasheet.ciiva.com/30120/aoa0000ce2-30120364.pdf?src-supplier=Onlinecomponents.com; ComponentLink4Description: https://datasheet.ciiva.com/30120/aoa0000ce2-30120364.pdf?src-supplier=Onlinecomponents.com; ComponentLink5URL: https://datasheet.ciiva.com/46445/1678782-46445791.pdf?src-supplier=Element14; ComponentLink5Description: https://datasheet.ciiva.com/46445/1678782-46445791.pdf?src-supplier=Element14; ComponentLink6URL: https://datasheet.ciiva.com/7944/aoa0000ce2-7944620.pdf?src-supplier=Element14; ComponentLink6Description: https://datasheet.ciiva.com/7944/aoa0000ce2-7944620.pdf?src-supplier=Element14; ComponentLink7URL: https://datasheet.ciiva.com/22684/1678782-22684789.pdf?src-supplier=Element14; ComponentLink7Description: https://datasheet.ciiva.com/22684/1678782-22684789.pdf?src-supplier=Element14; ComponentLink8URL: https://datasheet.ciiva.com/22687/1678782-22687416.pdf?src-supplier=Element14; ComponentLink8Description: https://datasheet.ciiva.com/22687/1678782-22687416.pdf?src-supplier=Element14
footprint Res-0603
pins: 1, 2

## ERJ-3GEY0R00V
designator R?, comment 0R
RES SMD 0 OHM JUMPER 1/10W 0603; Manufacturer: Panasonic; Manufacturer Part Number: ERJ-3GEY0R00V; Power Rating: 100mW; Voltage Rating: 75V; Tolerance: 0%; Temperature Coefficient: 200ppm/°C; Voltage Rating (DC): 50V; Supplier: Mouser; Supplier Part Number: 667-ERJ-3GEY0R00V; RoHS: Yes; Category: Chip SMD Resistors; Stock: 9094861; Pricing: 1=0.1, 10=0.044, 50=0.044, 100=0.019, 1000=0.008, 5000=0.006, 10000=0.004 (USD); Mounting Technology: Surface Mount; Case/Package: 0603; Contact Plating: Tin; Case Code (Metric): 1608; Case Code (Imperial): 0603; Min Operating Temperature: -55°C; Max Operating Temperature: 155°C; Value: 0R; Resistor Type: Thick Film; Packaging: Tape and Reel; Package Quantity: 5000; Number of Terminations: 2; Termination: SMD/SMT; Max Power Dissipation: 100mW; Features: Automotive AEC-Q200; Series: ERJ; Construction: Rectangular; Technology: THICK FILM; Length: 1.6mm; Width: 0.8mm; Height: 0.45mm; Depth: 0.8mm; Ratings: AEC-Q200; Radiation Hardening: No; Reach SVHC Compliant: No; Military Standard: Not; Lead Free: Lead Free; RoHS Compliant: Yes; ComponentLink1URL: https://datasheet.ciiva.com/27055/1935748-27055113.pdf?src-supplier=Jameco; ComponentLink1Description: https://datasheet.ciiva.com/27055/1935748-27055113.pdf?src-supplier=Jameco; ComponentLink2URL: https://datasheet.ciiva.com/11808/0900766b80f806dd-11808207.pdf?src-supplier=Rs; ComponentLink2Description: https://datasheet.ciiva.com/11808/0900766b80f806dd-11808207.pdf?src-supplier=Rs; ComponentLink3URL: https://datasheet.ciiva.com/46377/1678796-46377868.pdf?src-supplier=Element14; ComponentLink3Description: https://datasheet.ciiva.com/46377/1678796-46377868.pdf?src-supplier=Element14; ComponentLink4URL: https://datasheet.ciiva.com/28695/1678796-28695833.pdf?src-supplier=Element14; ComponentLink4Description: https://datasheet.ciiva.com/28695/1678796-28695833.pdf?src-supplier=Element14; ComponentLink5URL: https://datasheet.ciiva.com/16834/aoa0000ce1-16834828.pdf?src-supplier=Future+Electronics; ComponentLink5Description: https://datasheet.ciiva.com/16834/aoa0000ce1-16834828.pdf?src-supplier=Future+Electronics; ComponentLink6URL: https://datasheet.ciiva.com/48532/aoa0000ce1-48532165.pdf?src-supplier=Avnet; ComponentLink6Description: https://datasheet.ciiva.com/48532/aoa0000ce1-48532165.pdf?src-supplier=Avnet; ComponentLink7URL: https://datasheet.ciiva.com/5959/1678796-5959707.pdf?src-supplier=Farnell; ComponentLink7Description: https://datasheet.ciiva.com/5959/1678796-5959707.pdf?src-supplier=Farnell; ComponentLink8URL: https://datasheet.ciiva.com/16758/70255313-16758527.pdf?src-supplier=Allied+Electronics; ComponentLink8Description: https://datasheet.ciiva.com/16758/70255313-16758527.pdf?src-supplier=Allied+Electronics; ComponentLink9URL: https://datasheet.ciiva.com/9198/aoa0000ce1-9198975.pdf?src-supplier=Avnet; ComponentLink9Description: https://datasheet.ciiva.com/9198/aoa0000ce1-9198975.pdf?src-supplier=Avnet; ComponentLink10URL: https://datasheet.ciiva.com/30199/4aoa0000ce1-30199822.pdf?src-supplier=Onlinecomponents.com; ComponentLink10Description: https://datasheet.ciiva.com/30199/4aoa0000ce1-30199822.pdf?src-supplier=Onlinecomponents.com; ComponentLink11URL: https://datasheet.ciiva.com/43460/1678796-43460647.pdf?src-supplier=Farnell; ComponentLink11Description: https://datasheet.ciiva.com/43460/1678796-43460647.pdf?src-supplier=Farnell
footprint Res-0603
pins: 1, 2

## ERJ-U3RD3301V
designator R?, comment 3.3K
RES 3.3K OHM 0.5% 1/10W 0603 SMD; Manufacturer: Panasonic; Manufacturer Part Number: ERJ-U3RD3301V; Supplier: Mouser; Supplier Part Number: 667-ERJ-U3RD3301V; RoHS: No; Category: Chip SMD Resistors; Stock: 19153; Pricing: 1=0.19, 10=0.105, 50=0.105, 100=0.047, 1000=0.029, 10000=0.023 (USD)
footprint Res-0603
pins: 1, 2

## ESDA6V1W5
designator D?
TVS DIODE 3VWM SOT3235; Manufacturer: STMicroelectronics; Manufacturer Part Number: ESDA6V1W5; Direction: Unidirectional; Number of Elements: 4; Capacitance: 90pF; Reverse Breakdown Voltage: 6.1V; Operating Supply Voltage: 3V; Element Configuration: Common Anode; Breakdown Voltage: 7.2V; Peak Pulse Power: 150W; Power Line Protection: No; Leakage Current: 1uA; Test Current: 1mA; ESD Protection: Yes; Peak Pulse Current: 15A; Diode Type: ZENER; Supplier 1: Arrow Electronics; RoHS: Yes; Category: TVS Diodes; Stock 1: 3304; Pricing 1: 1=0.46690, 10=0.38770, 25=0.37260, 100=0.27930, 250=0.27650, 500=0.23480, 1000=0.21350, 3000=0.10000 (USD); Mount: Surface Mount; Case/Package: SOT-323; Number of Pins: 5; Min Operating Temperature: -40°C; Max Operating Temperature: 125°C; Packaging: Tape and Reel; Package Quantity: 1; Polarity: Unidirectional; Number of Channels: 4; Termination: SMD/SMT; Number of Unidirectional Channels: 4; Reverse Standoff Voltage: 3V; Min Breakdown Voltage: 6.1V; Working Voltage: 3V; Max Reverse Leakage Current: 1uA; Max Breakdown Voltage: 7.2V; Voltage Rating (DC): 6.1V; Resistor Type: Zener; Series: ESDA, TRANSIL™; Length: 2.2mm; Width: 1.35mm; Height: 1mm; Depth: 1.35mm; Radiation Hardening: No; Reach SVHC Compliant: Yes; Lead Free: Lead Free; RoHS Compliant: Yes; ComponentLink1URL: https://datasheet.ciiva.com/15143/getdatasheetpartid-134557-15143650.pdf?src-supplier=Verical; ComponentLink1Description: https://datasheet.ciiva.com/15143/getdatasheetpartid-134557-15143650.pdf?src-supplier=Verical; ComponentLink2URL: https://datasheet.ciiva.com/1276/1671027-1276908.pdf?src-supplier=Element14; ComponentLink2Description: https://datasheet.ciiva.com/1276/1671027-1276908.pdf?src-supplier=Element14; ComponentLink3URL: https://datasheet.ciiva.com/22695/1671027-22695673.pdf?src-supplier=Element14; ComponentLink3Description: https://datasheet.ciiva.com/22695/1671027-22695673.pdf?src-supplier=Element14; ComponentLink4URL: https://datasheet.ciiva.com/338/cd00064033-338380.pdf?src-supplier=Digi-Key; ComponentLink4Description: https://datasheet.ciiva.com/338/cd00064033-338380.pdf?src-supplier=Digi-Key; ComponentLink5URL: https://datasheet.ciiva.com/338/cd00064033-338379.pdf?src-supplier=Digi-Key; ComponentLink5Description: https://datasheet.ciiva.com/338/cd00064033-338379.pdf?src-supplier=Digi-Key; ComponentLink6URL: https://datasheet.ciiva.com/338/cd00064033-338381.pdf?src-supplier=Digi-Key; ComponentLink6Description: https://datasheet.ciiva.com/338/cd00064033-338381.pdf?src-supplier=Digi-Key; ComponentLink7URL: https://datasheet.ciiva.com/41443/001184222-da-01-en-transil-array-da-esda6v1w5-sot-323-5-stm-41443642.pdf?src-supplier=Conrad; ComponentLink7Description: https://datasheet.ciiva.com/41443/001184222-da-01-en-transil-array-da-esda6v1w5-sot-323-5-stm-41443642.pdf?src-supplier=Conrad; Supplier Part Number 1: ESDA6V1W5; LCSC Part Number: C48677; Item Type: Diode
footprint SOT-323-5
pins: 1 K, 2 A, 3 K, 4 K, 5 K

## ESHF-118-01-L-D-SM-TR
designator J?
CONN HEADER SMD 36POS 1.27MM; Manufacturer: Samtec; Manufacturer Part Number: ESHF-118-01-L-D-SM-TR; Supplier: Digi-Key; Supplier Part Number: ESHF-118-01-L-D-SM-TR-ND; RoHS: Yes; Category: Connectors; Pricing: 375=5.42571 (USD); RoHS Compliant: No
footprint ESHF-118-01-L-D-SM-TR
pins: 1, 2, 3, 4, 5, 6, 7, 8, 9, 10, 11, 12, 13, 14, 15, 16, 17, 18, 19, 20, 21, 22, 23, 24, 25, 26, 27, 28, 29, 30, 31, 32, 33, 34, 35, 36

## ESW-112-23-G-D
designator J?
CONN SOCKET 24POS 0.1 GOLD PCB; Manufacturer: Samtec; Manufacturer Part Number: ESW-112-23-G-D; Supplier: Digi-Key; Supplier Part Number: ESW-112-23-G-D-ND; RoHS: Yes; Category: Connectors; Stock: 108; Pricing: 1=7.81, 10=7.057, 100=6.1792, 500=5.20352, 1000=4.55308 (USD); ComponentLink1URL: https://datasheet.ciiva.com/15195/getdatasheetpartid-567182-15195174.pdf?src-supplier=Verical; ComponentLink1Description: https://datasheet.ciiva.com/15195/getdatasheetpartid-567182-15195174.pdf?src-supplier=Verical
footprint ESW-112-23-G-D
pins: 1, 2, 3, 4, 5, 6, 7, 8, 9, 10, 11, 12, 13, 14, 15, 16, 17, 18, 19, 20, 21, 22, 23, 24